# Altium footprint library WR-TBL_Pluggable Connector_5.08mm.PcbLib: 295 footprints (part 10 of 19)
Each footprint in its own frame and in the unit in brackets; x right, y up, seen from the top. Pads: shape width x height; smd on the part's side, far side on the other; paste and mask are expansions set on the pad; w line width, h text height; cw(c..) or ccw(c..) is an arc to the next point about the centre after c.
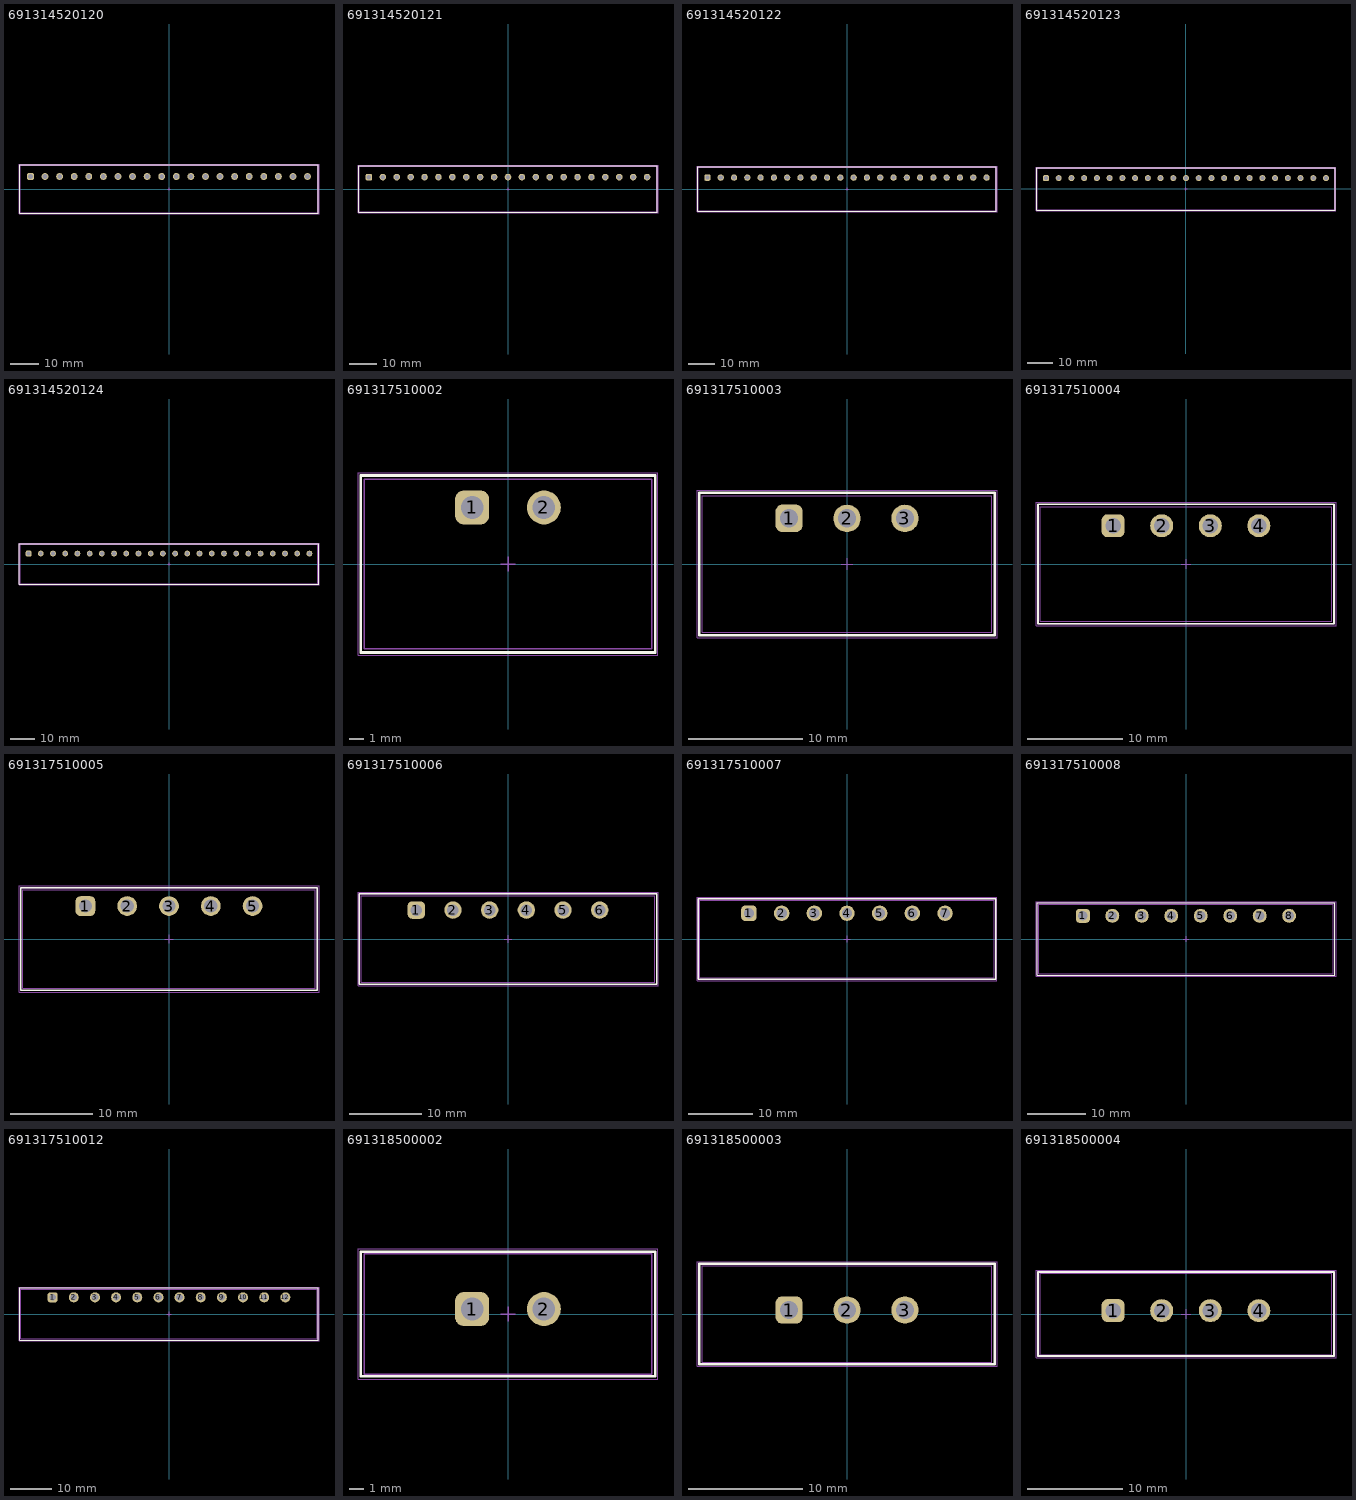
[diagram p9: the footprints below, top view; thin cyan lines are the x and y axes]

## 691314520120 [mm] "5,08mm - PCB Headers - 45¡ã- 20p"
height 14.5
pads (20):
  rrect50% 2.4x2.4 hole 1.6: 1(-48.26,4.35)
  round 2.4 hole 1.6: 2(-43.18,4.35) 3(-38.1,4.35) 4(-33.02,4.35) 5(-27.94,4.35) 6(-22.86,4.35) 7(-17.78,4.35) 8(-12.7,4.35) 9(-7.62,4.35) 10(-2.54,4.35) 11(2.54,4.35) 12(7.62,4.35) 13(12.7,4.35) 14(17.78,4.35) 15(22.86,4.35) 16(27.94,4.35) 17(33.02,4.35) 18(38.1,4.35) 19(43.18,4.35) 20(48.26,4.35)
Top Overlay:
  lines w0.2: -52.05,-8.5 -52.05,8.5 52.05,8.5 52.05,-8.5 -52.05,-8.5
Top Assembly:
  lines w0.1: -52.05,-8.5 52.05,-8.5 52.05,8.5 -52.05,8.5 -52.05,-8.5
Top Designator:
  text ".Designator" at -3.647,-0.357 h1
Top 3D Body:
  lines w0.1: -51.8,-8.25 -51.8,8.25 51.8,8.25 51.8,-8.25 -51.8,-8.25
Top Courtyard:
  lines w0.05: -52.25,-8.7 52.25,-8.7 52.25,8.7 -52.25,8.7 -52.25,-8.7
Top Component Center:
  lines w0.1: -0.5,0 0.5,0 ; 0,-0.5 0,0.5
3D body "691314520120.stp": height 14.9, standoff -3.5, extent -51.8,-8.25 51.8,8.644

## 691314520121 [mm] "5,08mm - PCB Headers - 45¡ã- 21p"
height 14.5
pads (21):
  rrect50% 2.4x2.4 hole 1.6: 1(-50.8,4.35)
  round 2.4 hole 1.6: 2(-45.72,4.35) 3(-40.64,4.35) 4(-35.56,4.35) 5(-30.48,4.35) 6(-25.4,4.35) 7(-20.32,4.35) 8(-15.24,4.35) 9(-10.16,4.35) 10(-5.08,4.35) 11(0,4.35) 12(5.08,4.35) 13(10.16,4.35) 14(15.24,4.35) 15(20.32,4.35) 16(25.4,4.35) 17(30.48,4.35) 18(35.56,4.35) 19(40.64,4.35) 20(45.72,4.35) 21(50.8,4.35)
Top Overlay:
  lines w0.2: -54.59,-8.5 -54.59,8.5 54.59,8.5 54.59,-8.5 -54.59,-8.5
Top Assembly:
  lines w0.1: -54.59,-8.5 54.59,-8.5 54.59,8.5 -54.59,8.5 -54.59,-8.5
Top Designator:
  text ".Designator" at -3.647,-0.357 h1
Top 3D Body:
  lines w0.1: -54.34,-8.25 -54.34,8.25 54.34,8.25 54.34,-8.25 -54.34,-8.25
Top Courtyard:
  lines w0.05: -54.79,-8.7 54.79,-8.7 54.79,8.7 -54.79,8.7 -54.79,-8.7
Top Component Center:
  lines w0.1: -0.5,0 0.5,0 ; 0,-0.5 0,0.5
3D body "691314520121.stp": height 14.9, standoff -3.5, extent -54.34,-8.25 54.34,8.644

## 691314520122 [mm] "5,08mm - PCB Headers - 45¡ã- 22p"
height 14.5
pads (22):
  rrect50% 2.4x2.4 hole 1.6: 1(-53.34,4.35)
  round 2.4 hole 1.6: 2(-48.26,4.35) 3(-43.18,4.35) 4(-38.1,4.35) 5(-33.02,4.35) 6(-27.94,4.35) 7(-22.86,4.35) 8(-17.78,4.35) 9(-12.7,4.35) 10(-7.62,4.35) 11(-2.54,4.35) 12(2.54,4.35) 13(7.62,4.35) 14(12.7,4.35) 15(17.78,4.35) 16(22.86,4.35) 17(27.94,4.35) 18(33.02,4.35) 19(38.1,4.35) 20(43.18,4.35) 21(48.26,4.35) 22(53.34,4.35)
Top Overlay:
  lines w0.2: -57.13,-8.5 -57.13,8.5 57.13,8.5 57.13,-8.5 -57.13,-8.5
Top Assembly:
  lines w0.1: -57.13,-8.5 57.13,-8.5 57.13,8.5 -57.13,8.5 -57.13,-8.5
Top Designator:
  text ".Designator" at -3.647,-0.357 h1
Top 3D Body:
  lines w0.1: -56.88,-8.25 -56.88,8.25 56.88,8.25 56.88,-8.25 -56.88,-8.25
Top Courtyard:
  lines w0.05: -57.33,-8.7 57.33,-8.7 57.33,8.7 -57.33,8.7 -57.33,-8.7
Top Component Center:
  lines w0.1: -0.5,0 0.5,0 ; 0,-0.5 0,0.5
3D body "691314520122.stp": height 14.9, standoff -3.5, extent -56.88,-8.25 56.88,8.644

## 691314520123 [mm] "5,08mm - PCB Headers - 45¡ã- 23p"
height 14.5
pads (23):
  rrect50% 2.4x2.4 hole 1.6: 1(-55.88,4.35)
  round 2.4 hole 1.6: 2(-50.8,4.35) 3(-45.72,4.35) 4(-40.64,4.35) 5(-35.56,4.35) 6(-30.48,4.35) 7(-25.4,4.35) 8(-20.32,4.35) 9(-15.24,4.35) 10(-10.16,4.35) 11(-5.08,4.35) 12(0,4.35) 13(5.08,4.35) 14(10.16,4.35) 15(15.24,4.35) 16(20.32,4.35) 17(25.4,4.35) 18(30.48,4.35) 19(35.56,4.35) 20(40.64,4.35) 21(45.72,4.35) 22(50.8,4.35) 23(55.88,4.35)
Top Overlay:
  lines w0.2: -59.67,-8.5 -59.67,8.5 59.67,8.5 59.67,-8.5 -59.67,-8.5
Top Assembly:
  lines w0.1: -59.67,-8.5 59.67,-8.5 59.67,8.5 -59.67,8.5 -59.67,-8.5
Top Designator:
  text ".Designator" at -3.647,-0.357 h1
Top 3D Body:
  lines w0.1: -59.42,-8.25 -59.42,8.25 59.42,8.25 59.42,-8.25 -59.42,-8.25
Top Courtyard:
  lines w0.05: -59.87,-8.7 59.87,-8.7 59.87,8.7 -59.87,8.7 -59.87,-8.7
Top Component Center:
  lines w0.1: -0.5,0 0.5,0 ; 0,-0.5 0,0.5
3D body "691314520123.stp": height 14.9, standoff -3.5, extent -59.42,-8.25 59.42,8.644

## 691314520124 [mm] "5,08mm - PCB Headers - 45¡ã- 24p"
height 14.5
pads (24):
  rrect50% 2.4x2.4 hole 1.6: 1(-58.42,4.35)
  round 2.4 hole 1.6: 2(-53.34,4.35) 3(-48.26,4.35) 4(-43.18,4.35) 5(-38.1,4.35) 6(-33.02,4.35) 7(-27.94,4.35) 8(-22.86,4.35) 9(-17.78,4.35) 10(-12.7,4.35) 11(-7.62,4.35) 12(-2.54,4.35) 13(2.54,4.35) 14(7.62,4.35) 15(12.7,4.35) 16(17.78,4.35) 17(22.86,4.35) 18(27.94,4.35) 19(33.02,4.35) 20(38.1,4.35) 21(43.18,4.35) 22(48.26,4.35) 23(53.34,4.35) 24(58.42,4.35)
Top Overlay:
  lines w0.2: -62.21,-8.5 -62.21,8.5 62.21,8.5 62.21,-8.5 -62.21,-8.5
Top Assembly:
  lines w0.1: -62.21,-8.5 62.21,-8.5 62.21,8.5 -62.21,8.5 -62.21,-8.5
Top Designator:
  text ".Designator" at -3.647,-0.357 h1
Top 3D Body:
  lines w0.1: -61.96,-8.25 -61.96,8.25 61.96,8.25 61.96,-8.25 -61.96,-8.25
Top Courtyard:
  lines w0.05: -62.41,-8.7 62.41,-8.7 62.41,8.7 -62.41,8.7 -62.41,-8.7
Top Component Center:
  lines w0.1: -0.5,0 0.5,0 ; 0,-0.5 0,0.5
3D body "691314520124.stp": height 14.9, standoff -3.5, extent -61.96,-8.25 61.96,8.644

## 691317510002 [mm] "5,08mm - PCB Horizontal Closed With flanges - 02p"
height 7.8
pads (2):
  rrect50% 2.4x2.4 hole 1.6: 1(-2.54,4)
  round 2.4 hole 1.6: 2(2.54,4)
Top Overlay:
  lines w0.2: -10.41,-6.25 10.41,-6.25 10.41,6.25 -10.41,6.25 -10.41,-6.25
Top Assembly:
  lines w0.1: -10.41,-6.25 -10.41,6.25 10.41,6.25 10.41,-6.25 -10.41,-6.25
Top Designator:
  text ".Designator" at -3.647,-0.357 h1
Top 3D Body:
  lines w0.1: -10.16,-6 10.16,-6 10.16,6 -10.16,6 -10.16,-6
Top Courtyard:
  lines w0.05: -10.61,-6.45 -10.61,6.45 10.61,6.45 10.61,-6.45 -10.61,-6.45
Top Component Center:
  lines w0.1: -0.5,0 0.5,0 ; 0,-0.5 0,0.5
3D body "691317510002.stp": height 8.55, standoff -3.35, extent -10.16,-6.02 10.16,6

## 691317510003 [mm] "5,08mm - PCB Horizontal Closed With flanges - 03p"
height 7.8
pads (3):
  rrect50% 2.4x2.4 hole 1.6: 1(-5.08,4)
  round 2.4 hole 1.6: 2(0,4) 3(5.08,4)
Top Overlay:
  lines w0.2: -12.95,-6.25 12.95,-6.25 12.95,6.25 -12.95,6.25 -12.95,-6.25
Top Assembly:
  lines w0.1: -12.95,-6.25 -12.95,6.25 12.95,6.25 12.95,-6.25 -12.95,-6.25
Top Designator:
  text ".Designator" at -3.647,-0.357 h1
Top 3D Body:
  lines w0.1: -12.7,-6 12.7,-6 12.7,6 -12.7,6 -12.7,-6
Top Courtyard:
  lines w0.05: -13.15,-6.45 -13.15,6.45 13.15,6.45 13.15,-6.45 -13.15,-6.45
Top Component Center:
  lines w0.1: -0.5,0 0.5,0 ; 0,-0.5 0,0.5
3D body "691317510003.stp": height 8.55, standoff -3.35, extent -12.7,-6.02 12.7,6

## 691317510004 [mm] "5,08mm - PCB Horizontal Closed With flanges - 04p"
height 7.8
pads (4):
  rrect50% 2.4x2.4 hole 1.6: 1(-7.62,4)
  round 2.4 hole 1.6: 2(-2.54,4) 3(2.54,4) 4(7.62,4)
Top Overlay:
  lines w0.2: -15.49,-6.25 15.49,-6.25 15.49,6.25 -15.49,6.25 -15.49,-6.25
Top Assembly:
  lines w0.1: -15.49,-6.25 -15.49,6.25 15.49,6.25 15.49,-6.25 -15.49,-6.25
Top Designator:
  text ".Designator" at -3.647,-0.357 h1
Top 3D Body:
  lines w0.1: -15.24,-6 15.24,-6 15.24,6 -15.24,6 -15.24,-6
Top Courtyard:
  lines w0.05: -15.69,-6.45 -15.69,6.45 15.69,6.45 15.69,-6.45 -15.69,-6.45
Top Component Center:
  lines w0.1: -0.5,0 0.5,0 ; 0,-0.5 0,0.5
3D body "691317510004.stp": height 8.55, standoff -3.35, extent -15.24,-6.02 15.24,6

## 691317510005 [mm] "5,08mm - PCB Horizontal Closed With flanges - 05p"
height 7.8
pads (5):
  rrect50% 2.4x2.4 hole 1.6: 1(-10.16,4)
  round 2.4 hole 1.6: 2(-5.08,4) 3(0,4) 4(5.08,4) 5(10.16,4)
Top Overlay:
  lines w0.2: -18.03,-6.25 -18.03,6.25 18.03,6.25 18.03,-6.25 -18.03,-6.25
Top Assembly:
  lines w0.1: -18.03,-6.25 18.03,-6.25 18.03,6.25 -18.03,6.25 -18.03,-6.25
Top Designator:
  text ".Designator" at -3.647,-0.357 h1
Top 3D Body:
  lines w0.1: -17.78,-6 -17.78,6 17.78,6 17.78,-6 -17.78,-6
Top Courtyard:
  lines w0.05: -18.23,-6.45 18.23,-6.45 18.23,6.45 -18.23,6.45 -18.23,-6.45
Top Component Center:
  lines w0.1: -0.5,0 0.5,0 ; 0,-0.5 0,0.5
3D body "691317510005.stp": height 8.55, standoff -3.35, extent -17.78,-6.02 17.78,6

## 691317510006 [mm] "5,08mm - PCB Horizontal Closed With flanges - 06p"
height 7.8
pads (6):
  rrect50% 2.4x2.4 hole 1.6: 1(-12.7,4)
  round 2.4 hole 1.6: 2(-7.62,4) 3(-2.54,4) 4(2.54,4) 5(7.62,4) 6(12.7,4)
Top Overlay:
  lines w0.2: -20.57,-6.25 20.57,-6.25 20.57,6.25 -20.57,6.25 -20.57,-6.25
Top Assembly:
  lines w0.1: -20.57,-6.25 -20.57,6.25 20.57,6.25 20.57,-6.25 -20.57,-6.25
Top Designator:
  text ".Designator" at -3.647,-0.357 h1
Top 3D Body:
  lines w0.1: -20.32,-6 20.32,-6 20.32,6 -20.32,6 -20.32,-6
Top Courtyard:
  lines w0.05: -20.77,-6.45 -20.77,6.45 20.77,6.45 20.77,-6.45 -20.77,-6.45
Top Component Center:
  lines w0.1: -0.5,0 0.5,0 ; 0,-0.5 0,0.5
3D body "691317510006.stp": height 8.55, standoff -3.35, extent -20.32,-6.02 20.32,6

## 691317510007 [mm] "5,08mm - PCB Horizontal Closed With flanges - 07p"
height 7.8
pads (7):
  rrect50% 2.4x2.4 hole 1.6: 1(-15.24,4)
  round 2.4 hole 1.6: 2(-10.16,4) 3(-5.08,4) 4(0,4) 5(5.08,4) 6(10.16,4) 7(15.24,4)
Top Overlay:
  lines w0.2: -23.11,-6.25 23.11,-6.25 23.11,6.25 -23.11,6.25 -23.11,-6.25
Top Assembly:
  lines w0.1: -23.11,-6.25 -23.11,6.25 23.11,6.25 23.11,-6.25 -23.11,-6.25
Top Designator:
  text ".Designator" at -3.647,-0.357 h1
Top 3D Body:
  lines w0.1: -22.86,-6 22.86,-6 22.86,6 -22.86,6 -22.86,-6
Top Courtyard:
  lines w0.05: -23.31,-6.45 -23.31,6.45 23.31,6.45 23.31,-6.45 -23.31,-6.45
Top Component Center:
  lines w0.1: -0.5,0 0.5,0 ; 0,-0.5 0,0.5
3D body "691317510007.stp": height 8.55, standoff -3.35, extent -22.86,-6.02 22.86,6

## 691317510008 [mm] "5,08mm - PCB Horizontal Closed With flanges - 08p"
height 7.8
pads (8):
  rrect50% 2.4x2.4 hole 1.6: 1(-17.78,4)
  round 2.4 hole 1.6: 2(-12.7,4) 3(-7.62,4) 4(-2.54,4) 5(2.54,4) 6(7.62,4) 7(12.7,4) 8(17.78,4)
Top Overlay:
  lines w0.2: -25.65,-6.25 25.65,-6.25 25.65,6.25 -25.65,6.25 -25.65,-6.25
Top Assembly:
  lines w0.1: -25.65,-6.25 -25.65,6.25 25.65,6.25 25.65,-6.25 -25.65,-6.25
Top Designator:
  text ".Designator" at -3.647,-0.357 h1
Top 3D Body:
  lines w0.1: -25.4,-6 25.4,-6 25.4,6 -25.4,6 -25.4,-6
Top Courtyard:
  lines w0.05: -25.85,-6.45 -25.85,6.45 25.85,6.45 25.85,-6.45 -25.85,-6.45
Top Component Center:
  lines w0.1: -0.5,0 0.5,0 ; 0,-0.5 0,0.5
3D body "691317510008.stp": height 8.55, standoff -3.35, extent -25.4,-6.02 25.4,6

## 691317510012 [mm] "5,08mm - PCB Horizontal Closed With flanges - 12p"
height 7.8
pads (12):
  rrect50% 2.4x2.4 hole 1.6: 1(-27.94,4)
  round 2.4 hole 1.6: 2(-22.86,4) 3(-17.78,4) 4(-12.7,4) 5(-7.62,4) 6(-2.54,4) 7(2.54,4) 8(7.62,4) 9(12.7,4) 10(17.78,4) 11(22.86,4) 12(27.94,4)
Top Overlay:
  lines w0.2: -35.81,-6.25 -35.81,6.25 35.81,6.25 35.81,-6.25 -35.81,-6.25
Top Assembly:
  lines w0.1: -35.81,-6.25 35.81,-6.25 35.81,6.25 -35.81,6.25 -35.81,-6.25
Top Designator:
  text ".Designator" at -3.647,-0.357 h1
Top 3D Body:
  lines w0.1: -35.56,-6 -35.56,6 35.56,6 35.56,-6 -35.56,-6
Top Courtyard:
  lines w0.05: -36.01,-6.45 36.01,-6.45 36.01,6.45 -36.01,6.45 -36.01,-6.45
Top Component Center:
  lines w0.1: -0.5,0 0.5,0 ; 0,-0.5 0,0.5
3D body "691317510012.stp": height 8.55, standoff -3.35, extent -35.56,-6.02 35.56,6

## 691318500002 [mm] "5,08mm - Closed Vertical PCB Header with Flanges - 02p"
height 12
pads (2):
  rrect50% 2.4x2.4 hole 1.6: 1(-2.54,0.35)
  round 2.4 hole 1.6: 2(2.54,0.35)
Top Overlay:
  lines w0.2: -10.41,-4.4 10.41,-4.4 10.41,4.4 -10.41,4.4 -10.41,-4.4
Top Assembly:
  lines w0.1: -10.41,-4.4 -10.41,4.4 10.41,4.4 10.41,-4.4 -10.41,-4.4
Top Designator:
  text ".Designator" at -3.647,-0.357 h1
Top 3D Body:
  lines w0.1: -10.16,-4.25 10.16,-4.25 10.16,4.25 -10.16,4.25 -10.16,-4.25
Top Courtyard:
  lines w0.05: -10.61,-4.6 10.61,-4.6 10.61,4.6 -10.61,4.6 -10.61,-4.6
Top Component Center:
  lines w0.1: -0.5,0 0.5,0 ; 0,-0.5 0,0.5
3D body "691318500002.stp": height 12.06, standoff -3.95, extent -10.16,-4.25 10.16,4.25

## 691318500003 [mm] "5,08mm - Closed Vertical PCB Header with Flanges - 03p"
height 12
pads (3):
  rrect50% 2.4x2.4 hole 1.6: 1(-5.08,0.35)
  round 2.4 hole 1.6: 2(0,0.35) 3(5.08,0.35)
Top Overlay:
  lines w0.2: -12.95,-4.4 12.95,-4.4 12.95,4.4 -12.95,4.4 -12.95,-4.4
Top Assembly:
  lines w0.1: -12.95,-4.4 -12.95,4.4 12.95,4.4 12.95,-4.4 -12.95,-4.4
Top Designator:
  text ".Designator" at -3.647,-0.357 h1
Top 3D Body:
  lines w0.1: -12.7,-4.25 12.7,-4.25 12.7,4.25 -12.7,4.25 -12.7,-4.25
Top Courtyard:
  lines w0.05: -13.15,-4.6 13.15,-4.6 13.15,4.6 -13.15,4.6 -13.15,-4.6
Top Component Center:
  lines w0.1: -0.5,0 0.5,0 ; 0,-0.5 0,0.5
3D body "691318500003.stp": height 12.06, standoff -3.95, extent -12.7,-4.25 12.7,4.25

## 691318500004 [mm] "5,08mm - Closed Vertical PCB Header with Flanges - 04p"
height 12
pads (4):
  rrect50% 2.4x2.4 hole 1.6: 1(-7.62,0.35)
  round 2.4 hole 1.6: 2(-2.54,0.35) 3(2.54,0.35) 4(7.62,0.35)
Top Overlay:
  lines w0.2: -15.49,-4.4 15.49,-4.4 15.49,4.4 -15.49,4.4 -15.49,-4.4
Top Assembly:
  lines w0.1: -15.49,-4.4 -15.49,4.4 15.49,4.4 15.49,-4.4 -15.49,-4.4
Top Designator:
  text ".Designator" at -3.647,-0.357 h1
Top 3D Body:
  lines w0.1: -15.24,-4.25 15.24,-4.25 15.24,4.25 -15.24,4.25 -15.24,-4.25
Top Courtyard:
  lines w0.05: -15.69,-4.6 15.69,-4.6 15.69,4.6 -15.69,4.6 -15.69,-4.6
Top Component Center:
  lines w0.1: -0.5,0 0.5,0 ; 0,-0.5 0,0.5
3D body "691318500004.stp": height 12.06, standoff -3.95, extent -15.24,-4.25 15.24,4.25